# EAGLE library part S2-LPCBQTR (library S2-LPCBQTR)
Ultra-low power, high performance, sub-1GHz transceiver Source: Datasheet <https://www.st.com/resource/en/datasheet/s2-lp.pdf>
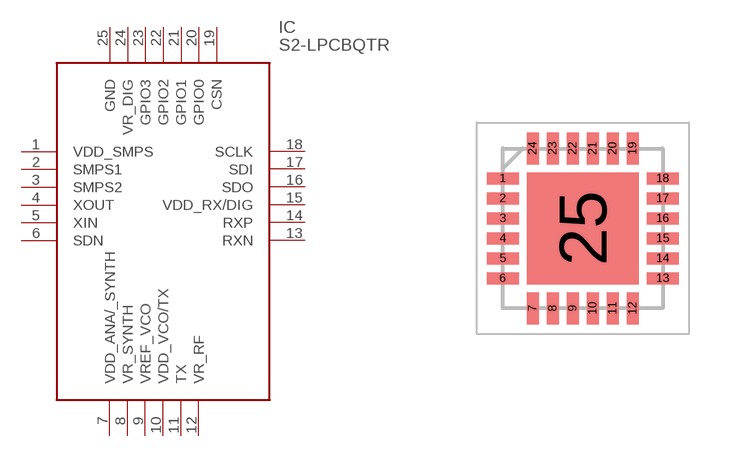
[diagram p0: symbol with the pads of QFN50P400X400X105-25N; footprint QFN50P400X400X105-25N]

Designator prefix IC

## S2-LPCBQTR (Description: Ultra-low power, high performance, sub-1GHz transceiver; Height: 1.05mm; Manufacturer_Name: STMicroelectronics; Manufacturer_Part_Number: S2-LPCBQTR; Mouser_Part_Number: 511-S2-LPCBQTR; Mouser_Price-Stock: https://www.mouser.co.uk/ProductDetail/STMicroelectronics/S2-LPCBQTR?qs=W0yvOO0ixfES%2FSAqpeZX6Q%3D%3D)  [QFN50P400X400X105-25N]
1  VDD_SMPS
2  SMPS1
3  SMPS2
4  XOUT
5  XIN
6  SDN
7  VDD_ANA/_SYNTH
8  VR_SYNTH
9  VREF_VCO
10  VDD_VCO/TX
11  TX
12  VR_RF
13  RXN
14  RXP
15  VDD_RX/DIG
16  SDO
17  SDI
18  SCLK
19  CSN
20  GPIO0
21  GPIO1
22  GPIO2
23  GPIO3
24  VR_DIG
25  GND

## Footprint QFN50P400X400X105-25N (pad centres in mm)
QFN24L (4x4 mm)-1
smd 0.8 x 0.3: 1 -2,1.25; 2 -2,0.75; 3 -2,0.25; 4 -2,-0.25; 5 -2,-0.75; 6 -2,-1.25; 13 2,-1.25; 14 2,-0.75; 15 2,-0.25; 16 2,0.25; 17 2,0.75; 18 2,1.25
smd 0.3 x 0.8: 7 -1.25,-2; 8 -0.75,-2; 9 -0.25,-2; 10 0.25,-2; 11 0.75,-2; 12 1.25,-2; 19 1.25,2; 20 0.75,2; 21 0.25,2; 22 -0.25,2; 23 -0.75,2; 24 -1.25,2
smd 2.8 x 2.8: 25 0,0